# Altium footprint library Connectors.PcbLib: 305 footprints (part 8 of 20)
Each footprint in its own frame and in the unit in brackets; x right, y up, seen from the top. Pads: shape width x height; smd on the part's side, far side on the other; paste and mask are expansions set on the pad; w line width, h text height; cw(c..) or ccw(c..) is an arc to the next point about the centre after c.
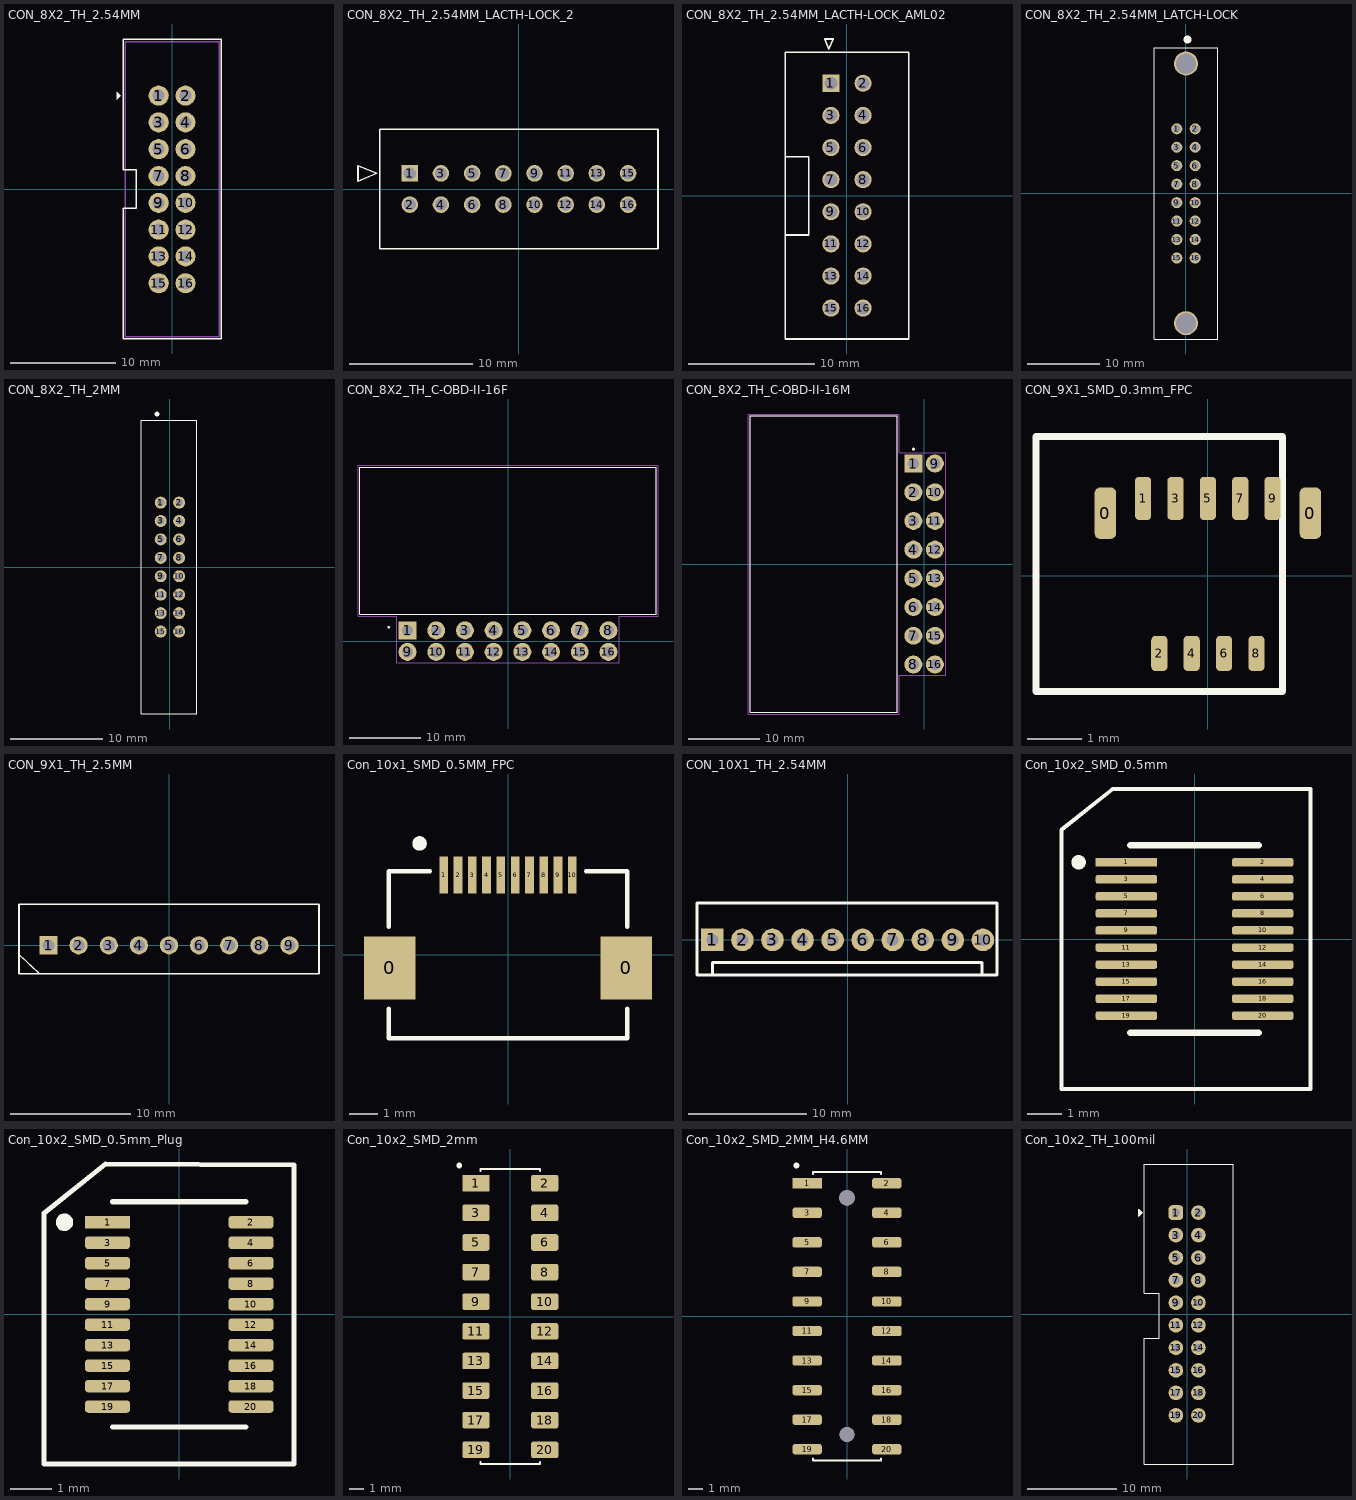
[diagram p7: the footprints below, top view; thin cyan lines are the x and y axes]

## CON_8X2_TH_2.54MM [mm] "/20220107/J-E.Pachon"
pads (16):
  round 1.905 hole 1.14: 1(-1.27,8.89) 2(1.27,8.89) 3(-1.27,6.35) 4(1.27,6.35) 5(-1.27,3.81) 6(1.27,3.81) 7(-1.27,1.27) 8(1.27,1.27) 9(-1.27,-1.27) 10(1.27,-1.27) 11(-1.27,-3.81) 12(1.27,-3.81) 13(-1.27,-6.35) 14(1.27,-6.35) 15(-1.27,-8.89) 16(1.27,-8.89)
Top Overlay:
  region: -5.262,9.257 -5.262,8.495 -4.847,8.89
  lines w0.127: -4.648,-14.173 -4.648,-1.803 -3.378,-1.803 -3.378,1.854 -4.648,1.854 -4.648,14.249 4.674,14.249 4.674,-14.173 -4.648,-14.173
Mechanical 1:
  lines w0.127: -4.42,-13.945 4.47,-13.945 4.47,13.995 -4.42,13.995 -4.42,-13.945
3D body "702461604.stp": height 9.28, standoff -3.42, extent -4.42,-13.945 4.47,13.995

## CON_8X2_TH_2.54MM_LACTH-LOCK_2 [mm] "20220225 / E.Naranjo"
pads (16):
  rect 1.35x1.35 hole 1 mask+0.076: 1(-8.89,1.27)
  round 1.35 hole 1 mask+0.076: 2(-8.89,-1.27) 3(-6.35,1.27) 4(-6.35,-1.27) 5(-3.81,1.27) 6(-3.81,-1.27) 7(-1.27,1.27) 8(-1.27,-1.27) 9(1.27,1.27) 10(1.27,-1.27) 11(3.81,1.27) 12(3.81,-1.27) 13(6.35,1.27) 14(6.35,-1.27) 15(8.89,1.27) 16(8.89,-1.27)
Top Overlay:
  lines w0.127: -13.108,0.635 -11.584,1.27 -13.108,1.905 -13.108,0.635 ; -11.33,-4.875 11.33,-4.875 11.33,4.875 -11.33,4.875 -11.33,-4.875
3D body "901301116.stp": height 10.06, standoff -3.74, extent -11.33,-4.875 11.33,4.875
3D body: height 0.25, standoff 0, extent -8.89,1.27 -8.636,1.524

## CON_8X2_TH_2.54MM_LACTH-LOCK_AML02 [mm] "20220322 /J-E.Pachon"
pads (16):
  rect 1.35x1.35 hole 1 mask+0.076: 1(-1.27,8.89)
  round 1.35 hole 1 mask+0.076: 2(1.27,8.89) 3(-1.27,6.35) 4(1.27,6.35) 5(-1.27,3.81) 6(1.27,3.81) 7(-1.27,1.27) 8(1.27,1.27) 9(-1.27,-1.27) 10(1.27,-1.27) 11(-1.27,-3.81) 12(1.27,-3.81) 13(-1.27,-6.35) 14(1.27,-6.35) 15(-1.27,-8.89) 16(1.27,-8.89)
Top Overlay:
  lines w0.127: -4.863,-3.11 -3.03,-3.11 -3.03,3.09 -4.859,3.09 ; -4.875,-11.33 -4.875,11.33 4.875,11.33 4.875,-11.33 -4.875,-11.33 ; -1.766,12.39 -1.43,11.584 -1.094,12.39 -1.766,12.39
3D body: height 0.25, standoff 0, extent 1.27,8.636 1.524,8.89
3D body "901301116.stp": height 10.06, standoff -3.74, extent -4.875,-11.33 4.875,11.33

## CON_8X2_TH_2.54MM_LATCH-LOCK [mil] "20220222 / E.Naranjo"
pads (18):
  round 60 hole 40 mask+0: 1(-50,350) 2(50,350) 3(-50,250) 4(50,250) 5(-50,150) 6(50,150) 7(-50,50) 8(50,50) 9(-50,-50) 10(50,-50) 11(-50,-150) 12(50,-150) 13(-50,-250) 14(50,-250) 15(-50,-350) 16(50,-350)
  round 130 hole 110 paste-99999 mask+0: ""(0,-703.15)
  round 130 hole 110 mask+0: ""(0,703.15)
Top Overlay:
  circle w39.37: c7.87,834.65 r1.97
  lines w6: -172.5,-789 172.5,-789 172.5,789 -172.5,789 -172.5,-789
3D body: height 10, standoff 0, extent 50,340 60,350
3D body "header_awh16g-0232-t.stp": height 1086.61, standoff -129.93, extent -154.27,-777.95 172.5,777.95

## CON_8X2_TH_2MM [mm] "20220222 / E.Naranjo"
pads (16):
  round 1.3 hole 0.8: 1(-1,7) 2(1,7) 3(-1,5) 4(1,5) 5(-1,3) 6(1,3) 7(-1,1) 8(1,1) 9(-1,-1) 10(1,-1) 11(-1,-3) 12(1,-3) 13(-1,-5) 14(1,-5) 15(-1,-7) 16(1,-7)
Top Overlay:
  circle w0.5: c-1.4,16.6 r0.01
  lines w0.127: -3.1,-15.95 2.9,-15.95 2.9,15.95 -3.1,15.95 -3.1,-15.95
3D body "CONN HEADER VERT 16POS 2MM - 3110-16-001-13-00-ND v1.step": height 21.09, standoff -2.9, extent -3.1,-17.914 2.9,17.915

## CON_8X2_TH_C-OBD-II-16F [mm] "/ 20201214 / M-C.Calderon"
pads (16):
  rect 2.5x2.5 hole 1.524: 1(-14,1.5)
  round 2.5 hole 1.524: 2(-10,1.5) 3(-6,1.5) 4(-2,1.5) 5(2,1.5) 6(6,1.5) 7(10,1.5) 8(14,1.5) 9(-14,-1.5) 10(-10,-1.5) 11(-6,-1.5) 12(-2,-1.5) 13(2,-1.5) 14(6,-1.5) 15(10,-1.5) 16(14,-1.5)
Top Overlay:
  circle w0.2: c-16.61,1.94 r0.1
  lines w0.127: -20.65,3.75 -20.65,24.25 20.65,24.25 20.65,3.75 -20.65,3.75
Top 3D Body (Mech13):
  circle w0.2: c-16.61,1.94 r0.1
  lines w0.127: -20.65,3.75 -20.65,24.25 20.65,24.25 20.65,3.75 -20.65,3.75
Mechanical 15:
  lines w0.05: -20.9,3.5 -15.5,3.5 -15.5,-3 15.5,-3 15.5,3.5 20.9,3.5 20.9,24.5 -20.9,24.5 -20.9,3.5
3D body "CCBDF20.STEP": height 17.56, standoff -0.74, extent -20.09,-2.01 20.406,27.79

## CON_8X2_TH_C-OBD-II-16M [mm] "/ 20201228 / M-C.Calderon"
pads (16):
  rect 2.5x2.5 hole 1.524: 1(-1.5,14)
  round 2.5 hole 1.524: 2(-1.5,10) 3(-1.5,6) 4(-1.5,2) 5(-1.5,-2) 6(-1.5,-6) 7(-1.5,-10) 8(-1.5,-14) 9(1.5,14) 10(1.5,10) 11(1.5,6) 12(1.5,2) 14(1.5,-6) 15(1.5,-10) 16(1.5,-14)
  round 2.5 hole 1.5: 13(1.5,-2)
Top Overlay:
  circle w0.2: c-1.5,16 r0.1
  lines w0.127: -24.25,-20.65 -24.25,20.65 -3.75,20.65 -3.75,-20.65 -24.25,-20.65
Top 3D Body (Mech13):
  circle w0.2: c-1.5,16 r0.1
  lines w0.127: -24.25,-20.65 -24.25,20.65 -3.75,20.65 -3.75,-20.65 -24.25,-20.65
Mechanical 15:
  lines w0.05: -24.5,-20.9 -3.5,-20.9 -3.5,-15.5 3,-15.5 3,15.5 -3.5,15.5 -3.5,20.9 -24.5,20.9 -24.5,-20.9
3D body "COMTECH_OBD-II-16M-E-N-12V_RA.STEP": height 18.92, standoff 0.01, extent -24.13,-20.195 2.02,20.355

## CON_9X1_SMD_0.3mm_FPC [mm] "20211217 / E.Naranjo"
pads (11):
  rrect50% 0.4x0.95 smd: 0(-1.9,1.162) 0(1.9,1.162)
  rrect50% 0.3x0.8 smd: 1(-1.2,1.438) 3(-0.6,1.438) 5(0,1.438) 7(0.6,1.438) 9(1.2,1.438)
  rrect50% 0.3x0.65 smd: 2(-0.9,-1.438) 4(-0.3,-1.438) 6(0.3,-1.438) 8(0.9,-1.438)
Top Overlay:
  lines w0.127: -3.186,-2.142 1.386,-2.142 1.386,2.583 -3.186,2.583 -3.186,-2.142
3D body "FH35C-9S-0.3SHW-99---3DModel-STEP-1.STEP": height 0.9, standoff 0, extent -2.15,-2.507 2.15,1.694

## CON_9X1_TH_2.5MM [mm] "20220608 / E.Naranjo"
pads (9):
  rect 1.508x1.508 hole 1: 1(-10,0)
  round 1.508 hole 1: 2(-7.5,0) 3(-5,0) 4(-2.5,0) 5(0,0) 6(2.5,0) 7(5,0) 8(7.5,0) 9(10,0)
Top Overlay:
  lines w0.127: -12.45,-0.754 -10.754,-2.35 ; -12.45,-2.35 12.45,-2.35 12.45,3.4 -12.45,3.4 -12.45,-2.35
3D body "B9B-XH-A-LF--SN---3DModel-STEP-418109.STEP": height 6.51, standoff -3.89, extent -12.45,-2.375 12.45,3.375

## Con_10x1_SMD_0.5MM_FPC [mil] "/20230907/J-E.Pachon"
pads (12):
  rect 71x87 smd: 0(-163.39,-17.95) 0(163.39,-17.95)
  rect 12x51 smd: 1(-88.58,110) 2(-68.9,110) 3(-49.21,110) 4(-29.53,110) 5(-9.84,110) 6(9.84,110) 7(29.53,110) 8(49.21,110) 9(68.9,110) 10(88.58,110)
Top Overlay:
  circle w10: c-122.05,153.54 r5
  lines w6: -164.5,-74.55 -164.5,-115 164.5,-115 164.5,-74.55 ; -164.5,38.65 -164.5,115 -107.68,115 ; 107.68,115 164.5,115 164.5,38.65
3D body "FH12-10S-0.5SH.stp": height 83.86, standoff 1.06, extent -179.15,-129.92 179.15,122.05

## CON_10X1_TH_2.54MM [mil] "/20200110/V-A.Patino"
pads (10):
  rect 75x75 hole 40: 1(-450,0)
  round 75 hole 40: 2(-350,0) 3(-250,0) 4(-150,0) 5(-50,0) 6(50,0) 7(150,0) 8(250,0) 9(350,0) 10(450,0)
Top Overlay:
  lines w10: -450,-115.35 -450,-75 446.85,-75 446.85,-114.96 ; -501.18,-116.14 -501.18,122.05 496.92,122.05 496.92,-116.14 -501.18,-116.14
3D body "022232101.stp": height 420.49, standoff -139.51, extent -497.08,-122.43 496.92,127.57

## Con_10x2_SMD_0.5mm [mm] "/20230217/N-A.potosi"
pads (20):
  rect 1.8x0.25 smd: 1(-2,2.25)
  rrect50% 1.8x0.25 smd: 2(2,2.25) 3(-2,1.75) 4(2,1.75) 5(-2,1.25) 6(2,1.25) 7(-2,0.75) 8(2,0.75) 9(-2,0.25) 10(2,0.25) 11(-2,-0.25) 12(2,-0.25) 13(-2,-0.75) 14(2,-0.75) 15(-2,-1.25) 16(2,-1.25) 17(-2,-1.75) 18(2,-1.75) 19(-2,-2.25) 20(2,-2.25)
Top Overlay:
  circle w0.127: c-3.4,2.25 r0.15
  lines w0.127: -3.349,2.279 ccw(c-3.4,2.25) -3.341,2.25 ; -3.9,-4.4 -3.9,3.2 -2.4,4.4 3.4,4.4 3.4,-4.4 -3.9,-4.4
  lines w0.203: -1.875,-2.75 1.875,-2.75 ; -1.875,2.75 1.875,2.75
3D body "541670208.stp": height 2.33, standoff 0.01, extent -2.7,-4.4 2.7,4.4

## Con_10x2_SMD_0.5mm_Plug [mm] "/20230217/N-A.potosi"
pads (20):
  rect 1.1x0.3 smd: 1(-1.75,2.25)
  rrect50% 1.1x0.3 smd: 2(1.75,2.25) 3(-1.75,1.75) 4(1.75,1.75) 5(-1.75,1.25) 6(1.75,1.25) 7(-1.75,0.75) 8(1.75,0.75) 9(-1.75,0.25) 10(1.75,0.25) 11(-1.75,-0.25) 12(1.75,-0.25) 13(-1.75,-0.75) 14(1.75,-0.75) 15(-1.75,-1.25) 16(1.75,-1.25) 17(-1.75,-1.75) 18(1.75,-1.75) 19(-1.75,-2.25) 20(1.75,-2.25)
Top Overlay:
  circle w0.127: c-2.8,2.25 r0.15
  lines w0.127: -2.829,2.198 cw(c-2.8,2.25) -2.8,2.191 ; -3.3,-3.65 2.8,-3.65 ; -3.3,-3.65 2.8,-3.65 ; -3.3,-3.65 -3.3,2.471 ; -3.3,-3.65 -3.3,2.471 ; -3.3,2.471 -1.8,3.671 ; -1.8,3.671 2.8,3.65 ; -1.8,3.671 2.8,3.65 ; 2.8,-3.65 2.8,3.65 ; 2.8,-3.65 2.8,3.65 ; -1.625,-2.75 1.625,-2.75 -1.625,-2.75 ; -1.625,2.75 1.625,2.75 -1.625,2.75
3D body "539160208.stp": height 3.5, standoff 0.01, extent -2.05,-3.65 2.05,3.65

## Con_10x2_SMD_2mm [mm] "/20230119/J-A.Sepulveda"
pads (20):
  rect 1.83x1.12 smd: 1(-2.325,9)
  rrect25% 1.83x1.12 smd: 2(2.325,9) 3(-2.325,7) 4(2.325,7) 5(-2.325,5) 6(2.325,5) 7(-2.325,3) 8(2.325,3) 9(-2.325,1) 10(2.325,1) 11(-2.325,-1) 12(2.325,-1) 13(-2.325,-3) 14(2.325,-3) 15(-2.325,-5) 16(2.325,-5) 17(-2.325,-7) 18(2.325,-7) 19(-2.325,-9) 20(2.325,-9)
Top Overlay:
  circle w0.2: c-3.45,10.2 r0.1
  lines w0.127: -2,-9.82 -2,-9.96 2,-9.96 2,-9.82 ; -2,9.82 -2,9.96 2,9.96 2,9.82
3D body "step_temp.STEP": height 4.5, standoff 0, extent -3,-9.96 3,9.96

## Con_10x2_SMD_2MM_H4.6MM [mm] "/20230621/J-A.Sepulveda"
pads (22):
  rect 2x0.7 smd: 1(-2.7,9)
  rrect50% 2x0.7 smd: 2(2.7,9) 3(-2.7,7) 4(2.7,7) 5(-2.7,5) 6(2.7,5) 7(-2.7,3) 8(2.7,3) 9(-2.7,1) 10(2.7,1) 11(-2.7,-1) 12(2.7,-1) 13(-2.7,-3) 14(2.7,-3) 15(-2.7,-5) 16(2.7,-5) 17(-2.7,-7) 18(2.7,-7) 19(-2.7,-9) 20(2.7,-9)
  round 1 hole 1 unplated: ""(0,-8)
  round 1.05 hole 1.05 unplated: ""(0,8)
Top Overlay:
  circle w0.2: c-3.425,10.2 r0.1
  lines w0.127: -2.3,-9.62 -2.3,-9.76 2.3,-9.76 2.3,-9.62 ; -2.3,9.62 -2.3,9.76 2.3,9.76 2.3,9.62
3D body "FH2.0x4.3-2x10T K4.5 W6.15.stp": height 4.6, standoff -0.7, extent -3.076,-10.2 3.075,10.2

## Con_10x2_TH_100mil [mil] "/ 20191007 / J-P.Vargas.A"
pads (20):
  rrect50% 65x65 hole 35: 1(-50,450)
  round 65 hole 35: 2(50,450) 3(-50,350) 4(50,350) 5(-50,250) 6(50,250) 7(-50,150) 8(50,150) 9(-50,50) 10(50,50) 11(-50,-50) 12(50,-50) 13(-50,-150) 14(50,-150) 15(-50,-250) 16(50,-250) 17(-50,-350) 18(50,-350) 19(-50,-450) 20(50,-450)
Top Overlay:
  region: -215.16,464.43 -215.16,434.43 -198.84,450
  lines w5: -191.28,92.8 -191.28,665.35 204.72,665.35 204.72,-665.35 -191.28,-665.35 -191.28,-108.2 -124.28,-108.2 -124.28,91.8 -190.28,91.8 ; -215.16,434.43 -198.84,450 -215.16,464.43 -215.16,434.43
3D body "61202021621.stp": height 348.93, standoff -127.45, extent -173.23,-650.79 187.99,650.79